# Altium schematic symbol library TMJD4012BENL.SchLib: 1 symbol
Pins are listed as number, name and electrical type; pins without a type are passive.

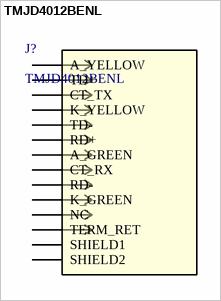
[diagram p0: symbol TMJD4012BENL]

## TMJD4012BENL
designator J?
No Description Available; Manufacturer_Name: Taoglas Limited; Type: Modular Connector Jacks With Magnetics; Copyright: Copyright (C) 2026 Ultra Librarian. All rights reserved.; Manufacturer_Part_Number: TMJD4012BENL; RefDes: RefDes
footprint CONN12_TMJD4012BENL_TAL
pins: 1 TD+, 2 CT_TX, 3 TD-, 4 RD+, 5 CT_RX, 6 RD-, 7 NC, 8 TERM_RET, 9 A_YELLOW, 10 K_YELLOW, 11 A_GREEN, 12 K_GREEN, 14 SHIELD1, 16 SHIELD2